# Altium footprint library SS90000009.PcbLib: 1 footprints
Each footprint in its own frame and in the unit in brackets; x right, y up, seen from the top. Pads: shape width x height; smd on the part's side, far side on the other; paste and mask are expansions set on the pad; w line width, h text height; cw(c..) or ccw(c..) is an arc to the next point about the centre after c.
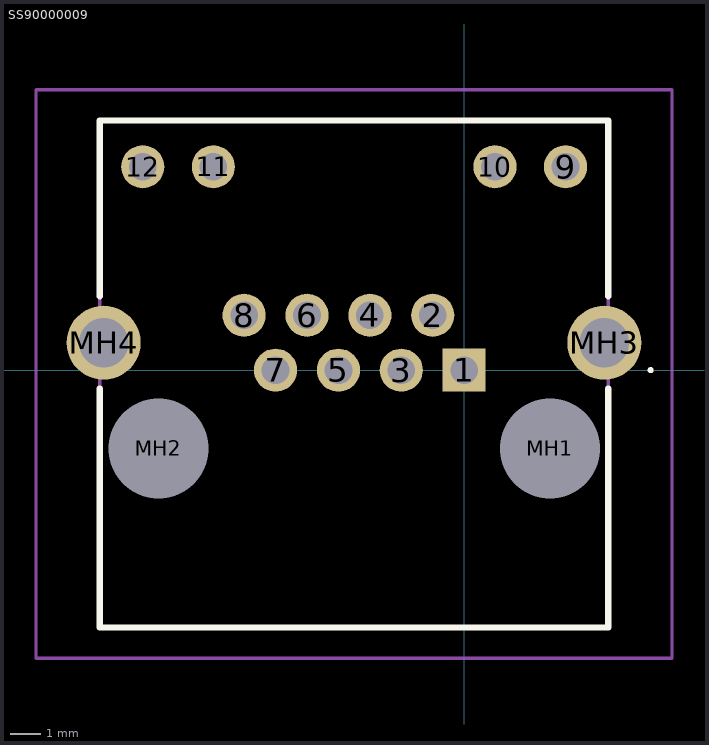
[diagram p0: the footprint, top view; thin cyan lines are the x and y axes]

## SS90000009 [mm]
pads (16):
  rect 1.4x1.4 hole 0.9: 1(0,0)
  round 1.4 hole 0.9: 2(-1.02,1.78) 3(-2.04,0) 4(-3.06,1.78) 5(-4.08,0) 6(-5.1,1.78) 7(-6.12,0) 8(-7.14,1.78) 9(3.29,6.6) 10(1,6.6) 11(-8.14,6.6) 12(-10.43,6.6)
  round 1.625 hole 3.25 unplated: MH1(2.78,-2.54) MH2(-9.92,-2.54)
  round 2.4 hole 1.6: MH3(4.55,0.89) MH4(-11.7,0.89)
Top Overlay:
  lines w0.1: 6,0 cw(c6.05,0) 6.1,0 ; 6,0 6,0 ; 6,0 ccw(c6.05,0) 6.1,0 ; 6.1,0 6.1,0
  lines w0.2: -11.825,-0.6 -11.825,-8.35 4.675,-8.35 4.675,-0.6 ; -11.825,2.4 -11.825,8.1 4.675,8.1 4.675,2.4
Mechanical 15:
  lines w0.1: -11.825,-8.35 4.675,-8.35 4.675,8.1 -11.825,8.1 -11.825,-8.35
Mechanical 20:
  lines w0.1: -13.9,-9.35 6.75,-9.35 6.75,9.1 -13.9,9.1 -13.9,-9.35